# Altium schematic symbol library PM.SchLib: 61 symbols (part 2 of 2)
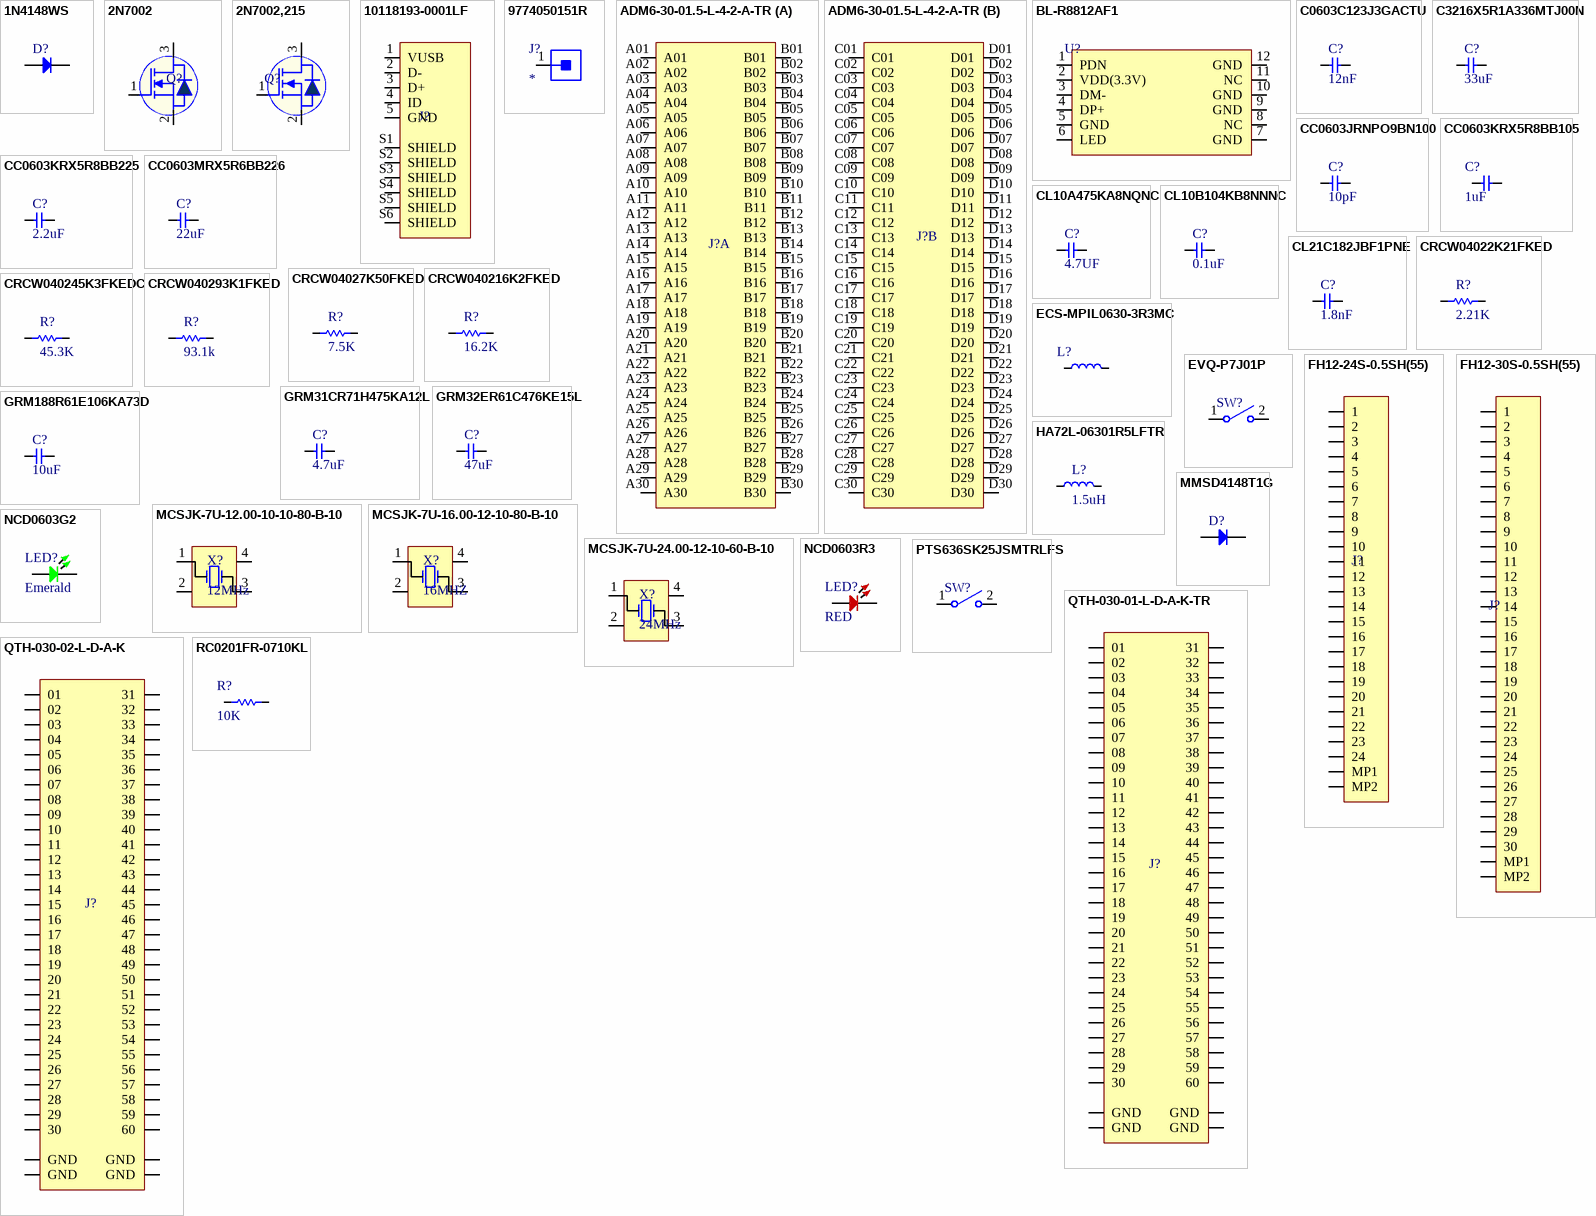
[diagram p2: symbols 1N4148WS to RC0201FR-0710KL]

## MCSJK-7U-12.00-10-10-80-B-10
designator X?, comment 12MHz
Crystal, 12Mhz, 10Pf, 3.2Mm X 2.5Mm Frequency Nom 12Mhz Crystal Case Smd Rohs; Manufacturer: Multicomp; Manufacturer Part Number: MCSJK-7U-12.00-10-10-80-B-10; Supplier: Newark; Supplier Part Number: 56AC8904; RoHS: Yes; Stock: 26807; Pricing: 1=0.428, 10=0.381, 100=0.3, 500=0.246, 1000=0.214, 5000=0.191, 10000=0.172, 25000=0.166 (USD); ComponentLink1URL: http://www.farnell.com/datasheets/2645227.pdf?src-supplier=Farnell; ComponentLink1Description: http://www.farnell.com/datasheets/2645227.pdf?src-supplier=Farnell; Item Type: Crystal
footprint MCSJK-7U-12.00-10-10-80-B-10
pins: 1 ENABLE CONTROL, 2 GND, 3 OUT PUT , 4 VDD

## MCSJK-7U-16.00-12-10-80-B-10
designator X?, comment 16MHZ
Crystal, 16MHZ, 12PF, 3.2MM X 2.5MM; Manufacturer: Multicomp; Manufacturer Part Number: MCSJK-7U-16.00-12-10-80-B-10; Supplier: Farnell; Supplier Part Number: 2853936; RoHS: No; Stock: 9269; Pricing: 5=0.201, 50=0.164, 250=0.143, 500=0.131, 1500=0.123, 3000=0.115, 15000=0.108, 30000=0.106 (GBP); ComponentLink1URL: http://www.farnell.com/datasheets/2864166.pdf?src-supplier=Farnell; ComponentLink1Description: http://www.farnell.com/datasheets/2864166.pdf?src-supplier=Farnell
footprint MCSJK-7U-16.00-12-10-80-B-10
pins: 1 ENABLE CONTROL, 2 GND, 3 OUT PUT , 4 VDD

## MCSJK-7U-24.00-12-10-60-B-10
designator X?, comment 24MHz
Crystal, 24Mhz, 12Pf, 3.2Mm X 2.5Mm; Manufacturer: Multicomp; Manufacturer Part Number: MCSJK-7U-24.00-12-10-60-B-10; Supplier: Newark; Supplier Part Number: 56AC8946; RoHS: No; Stock: 5313; Pricing: 5=0.328, 250=0.253, 500=0.227, 1000=0.207, 5000=0.189 (USD); Item Type: Crystal
footprint MCSJK-7U-24.00-12-10-60-B-10
pins: 1 ENABLE CONTROL, 2 GND, 3 OUT PUT , 4 VDD

## MMSD4148T1G
designator D?
DIODE GEN PURP 100V 200MA SOD123; Manufacturer: ON Semiconductor; Manufacturer Part Number: MMSD4148T1G; Reverse Recovery Time: 4ns; Peak Non-Repetitive Surge Current: 2A; Max Reverse Current: 5uA; Element Configuration: Single; Value: 4pF; Forward Voltage: 1V; Power Dissipation: 425mW; Polarity: Standard; Current Rating: 200A; Supplier: Future Electronics; Supplier Part Number: 4262259; RoHS: Yes; Category: Rectifier Diodes; Stock: 81000; Pricing: 3000=0.0149, 12000=0.0142, 45000=0.0137, 90000=0.0134, 225000=0.0127 (USD); Case/Package: SOD-123-2; Pins: 2; Min Operating Temperature: -55°C; Max Operating Temperature: 150°C; Max Repetitive Reverse Voltage (Vrrm): 100V; Forward Current: 200mA; Package Quantity: 3000; Packaging: Tape and Reel; Average Rectified Current: 200mA; Series: -; Recovery Time: 4ns; Max Surge Current: 2A; Max Forward Surge Current (Ifsm): 2A; Max Reverse Voltage (DC): 100V; Max Reverse Leakage Current: 5uA; Voltage Rating (DC): 100V; Output Current: 200mA; Reverse Recovery Time-Max: 4ns; Length: 2.69mm; Width: 1.6mm; Height: 1.12mm; Radiation Hardening: No; Lead Free: Lead Free; RoHS Compliant: Yes; Reach SVHC Compliant: No; Halogen Free: Halogen Free; ComponentLink1URL: https://datasheet.ciiva.com/22663/1707241-22663688.pdf?src-supplier=Element14; ComponentLink1Description: https://datasheet.ciiva.com/22663/1707241-22663688.pdf?src-supplier=Element14; ComponentLink2URL: https://datasheet.ciiva.com/8294/mmsd4148t1-d-8294902.pdf?src-supplier=Avnet; ComponentLink2Description: https://datasheet.ciiva.com/8294/mmsd4148t1-d-8294902.pdf?src-supplier=Avnet; ComponentLink3URL: https://datasheet.ciiva.com/915/mmsd4148t1-d-915383.pdf?src-supplier=Digi-Key; ComponentLink3Description: https://datasheet.ciiva.com/915/mmsd4148t1-d-915383.pdf?src-supplier=Digi-Key; ComponentLink4URL: https://datasheet.ciiva.com/915/mmsd4148t1-d-915384.pdf?src-supplier=Digi-Key; ComponentLink4Description: https://datasheet.ciiva.com/915/mmsd4148t1-d-915384.pdf?src-supplier=Digi-Key; ComponentLink5URL: https://datasheet.ciiva.com/915/mmsd4148t1-d-915385.pdf?src-supplier=Digi-Key; ComponentLink5Description: https://datasheet.ciiva.com/915/mmsd4148t1-d-915385.pdf?src-supplier=Digi-Key; ComponentLink6URL: https://datasheet.ciiva.com/8299/mmsd4148t1-d-8299883.pdf?src-supplier=Avnet; ComponentLink6Description: https://datasheet.ciiva.com/8299/mmsd4148t1-d-8299883.pdf?src-supplier=Avnet; ComponentLink7URL: https://datasheet.ciiva.com/16368/mmsd4148t1-d-16368570.pdf?src-supplier=Future+Electronics; ComponentLink7Description: https://datasheet.ciiva.com/16368/mmsd4148t1-d-16368570.pdf?src-supplier=Future+Electronics; ComponentLink8URL: https://datasheet.ciiva.com/8053/mmsd4148t1-d-8053692.pdf?src-supplier=Element14; ComponentLink8Description: https://datasheet.ciiva.com/8053/mmsd4148t1-d-8053692.pdf?src-supplier=Element14; ComponentLink9URL: https://datasheet.ciiva.com/8053/mmsd4148t1-d-8053693.pdf?src-supplier=Element14; ComponentLink9Description: https://datasheet.ciiva.com/8053/mmsd4148t1-d-8053693.pdf?src-supplier=Element14; ComponentLink10URL: https://datasheet.ciiva.com/15144/getdatasheetpartid-78734-15144509.pdf?src-supplier=Verical; ComponentLink10Description: https://datasheet.ciiva.com/15144/getdatasheetpartid-78734-15144509.pdf?src-supplier=Verical; LCSC Part Number: C11177; Item Type: Diode
footprint SOD-123
pins: 1 A, 2 K

## NCD0603G2
designator LED?, comment Emerald
Emerald 0603 Light Emitting Diodes (LED) ROHS; Manufacturer: Foshan NationStar Optoelectronics; Manufacturer Part Number: NCD0603G2; Package: 0603; LCSC Part Number: C87326; Item Type: LED; ComponentLink1Description: LCSC; ComponentLink1URL: https://www.lcsc.com/product-detail/Light-Emitting-Diodes-LED_Foshan-NationStar-Optoelectronics-NCD0603G2_C87326.html
footprint LED-0603
pins: 1, 2

## NCD0603R3
designator LED?, comment RED
RED LED 0603 Light Emitting Diodes; Manufacturer: Foshan NationStar Optoelectronics; Manufacturer Part Number: NCD0603R3; Package: 0603; Item Type: LED; LCSC Part Number: C3151730; ComponentLink1Description: LCSC; ComponentLink1URL: https://www.lcsc.com/product-detail/Light-Emitting-Diodes-LED_Foshan-NationStar-Optoelectronics-NCD0603R3_C3151730.html
footprint LED-0603
pins: 1, 2

## PTS636SK25JSMTRLFS
designator SW?
TACT 6.0 X 3.5, 2.5 MM H, 250GF,; Manufacturer: ITT C&K; Manufacturer Part Number: PTS636SK25JSMTRLFS; Item Type: Tactile Switch; Supplier: Digi-Key; Supplier Part Number: CKN12326-1-ND; RoHS: No; Stock: 75547; Pricing: 1=0.2, 10=0.19, 25=0.1804, 100=0.1641, 250=0.15428, 500=0.14114, 1000=0.11817 (USD)
footprint PTS636 SK25J SMTR LFS
pins: 1, 2

## QTH-030-01-L-D-A-K-TR
designator J?
CONN HDR 60POS SMD GOLD; Manufacturer: Samtec; Manufacturer Part Number: QTH-030-01-L-D-A-K-TR; Supplier: Rs; Supplier Part Number: 1802786; RoHS: Yes; Category: Connectors; Stock: 69; Pricing: 1=9.4, 25=8.99, 100=7.57, 250=6.25, 500=6.09 (GBP); ComponentLink1URL: https://datasheet.ciiva.com/9698/qth-9698170.pdf?src-supplier=Avnet; ComponentLink1Description: https://datasheet.ciiva.com/9698/qth-9698170.pdf?src-supplier=Avnet; ComponentLink2URL: https://datasheet.ciiva.com/400/qth-xxx-xx-x-d-xxx-mkt-400842.pdf?src-supplier=Digikey; ComponentLink2Description: https://datasheet.ciiva.com/400/qth-xxx-xx-x-d-xxx-mkt-400842.pdf?src-supplier=Digikey
footprint QTH-030-01-L-D-A-K-TR
pins: 01, 02, 03, 04, 05, 06, 07, 08, 09, 10, 11, 12, 13, 14, 15, 16, 17, 18, 19, 20, 21, 22, 23, 24, 25, 26, 27, 28, 29, 30, 31, 32, 33, 34, 35, 36, 37, 38, 39, 40, 41, 42, 43, 44, 45, 46, 47, 48, 49, 50, 51, 52, 53, 54, 55, 56, 57, 58, 59, 60, G1 GND (power), G2 GND (power), G3 GND (power), G4 GND (power)

## QTH-030-02-L-D-A-K
designator J?
CONN HDR 60POS SMD GOLD; Manufacturer: Samtec; Manufacturer Part Number: QTH-030-02-L-D-A-K; Number of Contacts: 60; Max Voltage Rating (AC): 125V; Gender: Male; Pitch: 0.5mm; Mated Stacking Heights: 8mm; Item Type: Connector; Supplier: Arrow Electronics; Supplier Part Number: QTH-030-02-L-D-A-K; RoHS: Yes; Category: Connectors; Stock: 29; Pricing: 1=8.646, 10=8.559, 25=8.474, 50=8.389, 100=6.689, 500=6.094, 1000=4.825, 2990=4.218, 8060=4.114, 17420=4.004 (USD); Contact Plating: Gold; Contact Material: Bronze; Housing Material: Polymer; Min Operating Temperature: -55°C; Max Operating Temperature: 125°C; Number of Rows: 2; Termination: Solder; Series: Q Strip® QTH; Number of Positions: 60; Orientation: Straight; Length: 20mm; Depth: 7.11mm; RoHS Compliant: Yes; ComponentLink1URL: https://datasheet.ciiva.com/9698/qth-9698092.pdf?src-supplier=Avnet; ComponentLink1Description: https://datasheet.ciiva.com/9698/qth-9698092.pdf?src-supplier=Avnet
footprint QTH-030-02-L-D-A-K
pins: 01, 02, 03, 04, 05, 06, 07, 08, 09, 10, 11, 12, 13, 14, 15, 16, 17, 18, 19, 20, 21, 22, 23, 24, 25, 26, 27, 28, 29, 30, 31, 32, 33, 34, 35, 36, 37, 38, 39, 40, 41, 42, 43, 44, 45, 46, 47, 48, 49, 50, 51, 52, 53, 54, 55, 56, 57, 58, 59, 60, G1 GND (power), G2 GND (power), G3 GND (power), G4 GND (power)

## RC0201FR-0710KL
designator R?, comment 10K
RES SMD 10K OHM 1% 1/20W 0201; Manufacturer: Yageo; Manufacturer Part Number: RC0201FR-0710KL; Item Type: Resistor; Package: 0201; ComponentLink7Description: LCSC; ComponentLink7URL: https://www.lcsc.com/product-detail/Chip-Resistor-Surface-Mount_YAGEO-RC0201FR-0710KL_C106225.html; LCSC Part Number: C106225
footprint Res-0201
pins: 1, 2

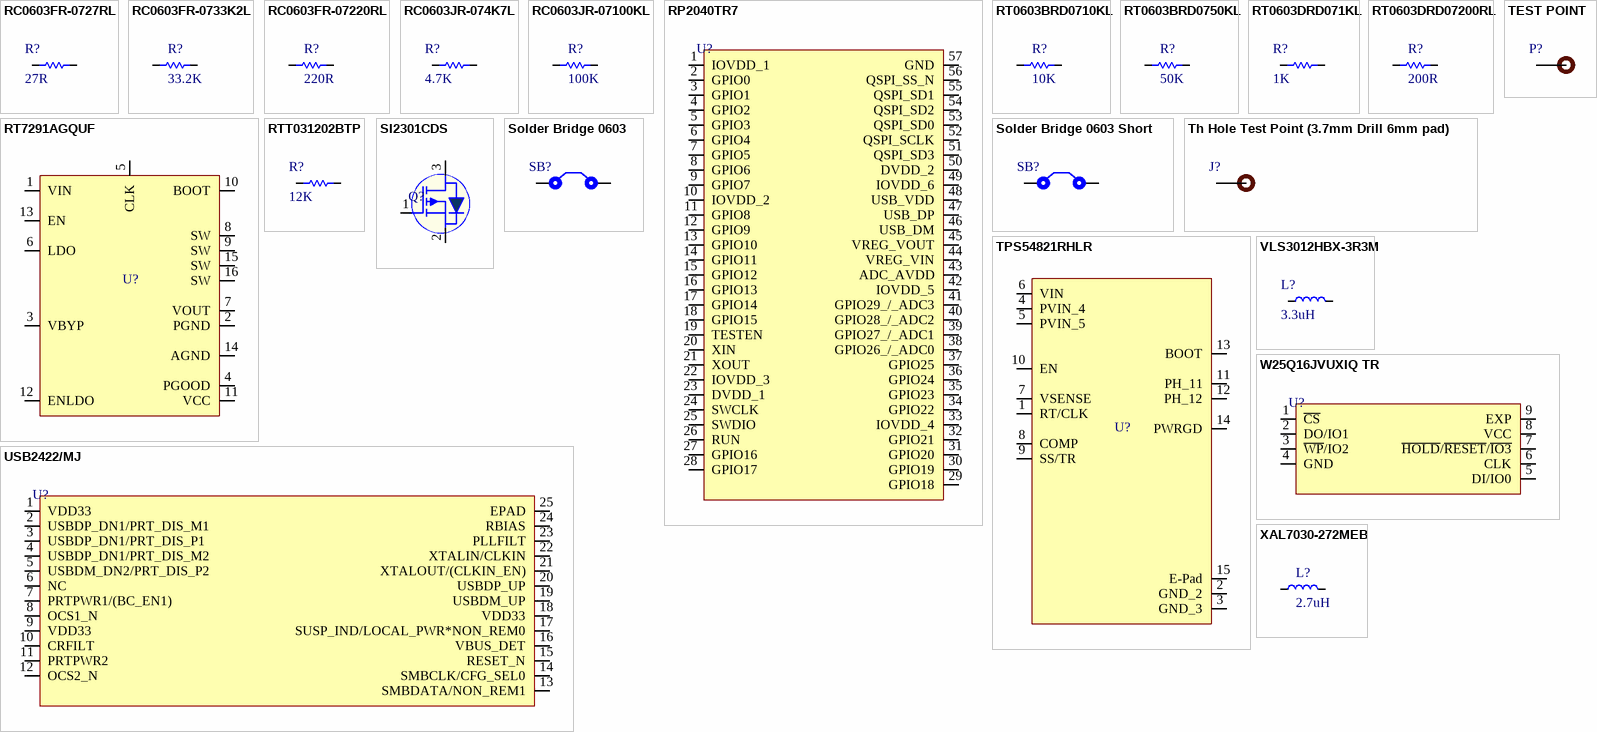
[diagram p1: symbols RC0603FR-0727RL to XAL7030-272MEB]

## RC0603FR-0727RL
designator R?, comment 27R
RES 27 OHM 1% 1/10W 0603; Manufacturer: Yageo; Manufacturer Part Number: RC0603FR-0727RL; Voltage Rating (DC): 50V; Temperature Coefficient: 100ppm/°C; Power Rating: 100mW; Item Type: Resistor; Supplier 1: Future Electronics; RoHS: Yes; Category: Chip SMD Resistors; Stock 1: 285000; Pricing 1: 5000=0.0015, 50000=0.0014, 200000=0.0014, 625000=0.0013, 2000000=0.0012 (USD); Case/Package: 0603; Pins: 2; Case Code (Metric): 1608; Case Code (Imperial): 0603; Min Operating Temperature: -55°C; Max Operating Temperature: 155°C; Value: 27R; Tolerance: 1%; Packaging: Tape and Reel; Resistor Type: Thick Film; Number of Terminations: 2; Voltage Rating: 50V; Termination: SMD/SMT; Max Power Dissipation: 100mW; Features: Moisture Resistant; Series: RC; Resistance Tolerance: 1%; Width: 0.8mm; Lead Free: Lead Free; Reach SVHC Compliant: Unknown; RoHS Compliant: Yes; ComponentLink1URL: https://datasheet.ciiva.com/2454/pyu-r-int-thick-7-2454031.pdf?src-supplier=Digi-Key; ComponentLink1Description: https://datasheet.ciiva.com/2454/pyu-r-int-thick-7-2454031.pdf?src-supplier=Digi-Key; ComponentLink2URL: https://datasheet.ciiva.com/2454/pyu-r-int-thick-7-2454032.pdf?src-supplier=Digi-Key; ComponentLink2Description: https://datasheet.ciiva.com/2454/pyu-r-int-thick-7-2454032.pdf?src-supplier=Digi-Key; ComponentLink3URL: https://datasheet.ciiva.com/2454/pyu-r-int-thick-7-2454030.pdf?src-supplier=Digi-Key; ComponentLink3Description: https://datasheet.ciiva.com/2454/pyu-r-int-thick-7-2454030.pdf?src-supplier=Digi-Key; ComponentLink4URL: https://datasheet.ciiva.com/7746/443971-7746313.pdf?src-supplier=Element14; ComponentLink4Description: https://datasheet.ciiva.com/7746/443971-7746313.pdf?src-supplier=Element14; ComponentLink5URL: https://datasheet.ciiva.com/7746/443971-7746314.pdf?src-supplier=Element14; ComponentLink5Description: https://datasheet.ciiva.com/7746/443971-7746314.pdf?src-supplier=Element14; Supplier Part Number 1: 9798455; LCSC Part Number: C137753
footprint Res-0603
pins: 1, 2

## RC0603FR-0733K2L
designator R?, comment 33.2K
RES 33.2K OHM 1% 1/10W 0603; Manufacturer: Yageo; Manufacturer Part Number: RC0603FR-0733K2L; Resistance: 33.2kR; Power Rating: 100mW; Voltage Rating: 50V; Temperature Coefficient: 100ppm/°C; Supplier 1: Digi-Key; RoHS: Yes; Category: Chip SMD Resistors; Stock 1: 1293262; Pricing 1: 1=0.10000, 10=0.02300, 100=0.00930, 1000=0.00417, 2500=0.00362 (USD); Mount: Surface Mount; Case/Package: 0603; Case Code (Imperial): 0603; Case Code (Metric): 1608; Size Code: 0603; Min Operating Temperature: -55°C; Max Operating Temperature: 155°C; Tolerance: 1%; Packaging: Tape and Reel; Termination: SMD/SMT; Resistor Type: Thick Film; Voltage Rating (DC): 50V; Features: Moisture Resistant; Series: RC; Max Power Dissipation: 100mW; Number of Terminations: 2; Construction: Rectangular; Technology: THICK FILM; Length: 1.6mm; Height: 0.45mm; Depth: 0.8mm; Military Standard: Not; Lead Free: Lead Free; RoHS Compliant: Yes; ComponentLink1URL: https://datasheet.ciiva.com/11808/0900766b80f96399-11808316.pdf?src-supplier=RSComponents; ComponentLink1Description: https://datasheet.ciiva.com/11808/0900766b80f96399-11808316.pdf?src-supplier=RSComponents; Supplier Part Number 1: 311-33.2KHRCT-ND; LCSC Part Number: C185338
footprint Res-0603
pins: 1, 2

## RC0603FR-07220RL
designator R?, comment 220R
RES SMD 220 OHM 1% 1/10W 0603; Manufacturer: Yageo; Manufacturer Part Number: RC0603FR-07220RL; Temperature Coefficient: 100ppm/°C; Voltage Rating (DC): 50V; Power Rating: 100mW; Item Type: Resistor; Supplier 1: Digi-Key; Stock 1: 5843995; Pricing 1: 1=0.1, 10=0.023, 100=0.0094, 1000=0.00421, 2500=0.00366 (USD); Case/Package: 0603; Number of Pins: 2; Case Code (Imperial): 0603; Case Code (Metric): 1608; Min Operating Temperature: -55°C; Max Operating Temperature: 155°C; Resistance: 220R; Tolerance: 1%; Composition: Thick Film; Packaging: Tape and Reel; Voltage Rating: 50V; Package Quantity: 1; Termination: SMD/SMT; Number of Terminations: 2; Military Standard: Not; Max Power Dissipation: 100mW; Features: Moisture Resistant; Length: 1.6mm; Height: 0.022inch; Width: 0.031inch; Depth: 0.8mm; REACH SVHC: No SVHC; Lead Free: Lead Free; ComponentLink1URL: http://www.yageo.com/documents/recent/PYu-RC_Group_51_RoHS_L_10.pdf?src-supplier=Digi-Key; ComponentLink1Description: http://www.yageo.com/documents/recent/PYu-RC_Group_51_RoHS_L_10.pdf?src-supplier=Digi-Key; ComponentLink2URL: http://www.farnell.com/datasheets/1868787.pdf?src-supplier=Element14; ComponentLink2Description: http://www.farnell.com/datasheets/1868787.pdf?src-supplier=Element14; Supplier Part Number 1: 311-220HRCT-ND; LCSC Part Number: C107696
footprint Res-0603
pins: 1, 2

## RC0603JR-074K7L
designator R?, comment 4.7K
RES SMD 4.7K OHM 5% 1/10W 0603; Manufacturer: Yageo; Manufacturer Part Number: RC0603JR-074K7L; Resistance: 4.7kR; Temperature Coefficient: 100ppm/°C; Voltage Rating (DC): 50V; Power Rating: 100mW; Item Type: Resistor; Supplier 1: Digi-Key; Stock 1: 19706643; Pricing 1: 1=0.1, 10=0.02, 100=0.0081, 1000=0.00362, 2500=0.00314 (USD); Case/Package: 0603; Number of Pins: 2; Case Code (Imperial): 0603; Case Code (Metric): 1608; Min Operating Temperature: -55°C; Max Operating Temperature: 155°C; Tolerance: 5%; Composition: Thick Film; Packaging: Tape and Reel; Voltage Rating: 50V; Termination: SMD/SMT; Military Standard: Not; Length: 1.6mm; Width: 0.8mm; Depth: 0.8mm; REACH SVHC: No SVHC; Lead Free: Lead Free; ComponentLink1URL: http://www.farnell.com/datasheets/443971.pdf?src-supplier=Element14; ComponentLink1Description: http://www.farnell.com/datasheets/443971.pdf?src-supplier=Element14; Supplier Part Number 1: 311-4.7KGRCT-ND; LCSC Part Number: C105428
footprint Res-0603
pins: 1, 2

## RC0603JR-07100KL
designator R?, comment 100K
RES 100K OHM 5% 1/10W 0603; Manufacturer: Yageo; Manufacturer Part Number: RC0603JR-07100KL; Resistance: 100kR; Temperature Coefficient: 100ppm/°C; Voltage Rating: 50V; Power Rating: 100mW; Item Type: Resistor; Supplier 1: Digi-Key; RoHS: Yes; Category: Chip SMD Resistors; Stock 1: 1210037; Pricing 1: 1=0.10000, 10=0.02000, 100=0.00800, 1000=0.00360, 2500=0.00312 (USD); Case/Package: 0603; Number of Pins: 2; Contact Plating: Tin,Matte; Case Code (Imperial): 0603; Case Code (Metric): 1608; Size Code: 0603; Min Operating Temperature: -55°C; Max Operating Temperature: 155°C; Tolerance: 5%; Resistor Type: Thick Film; Packaging: Tape and Reel; Voltage Rating (DC): 50V; Termination: SMD/SMT; Features: Moisture Resistant; Series: RC; Max Power Dissipation: 100mW; Number of Terminations: 2; Resistance Tolerance: 5%; Width: 0.8mm; Radiation Hardening: No; REACH SVHC: No SVHC; Lead Free: Lead Free; RoHS Compliant: Yes; ComponentLink1URL: https://datasheet.ciiva.com/7746/443971-7746424.pdf?src-supplier=Element14; ComponentLink1Description: https://datasheet.ciiva.com/7746/443971-7746424.pdf?src-supplier=Element14; ComponentLink2URL: https://datasheet.ciiva.com/7983/443971-7983686.pdf?src-supplier=Element14; ComponentLink2Description: https://datasheet.ciiva.com/7983/443971-7983686.pdf?src-supplier=Element14; ComponentLink3URL: https://datasheet.ciiva.com/7746/443971-7746423.pdf?src-supplier=Element14; ComponentLink3Description: https://datasheet.ciiva.com/7746/443971-7746423.pdf?src-supplier=Element14; ComponentLink4URL: https://datasheet.ciiva.com/8887/pyu-rc0603-51-rohs-l-4-8887903.pdf?src-supplier=Avnet; ComponentLink4Description: https://datasheet.ciiva.com/8887/pyu-rc0603-51-rohs-l-4-8887903.pdf?src-supplier=Avnet; Supplier Part Number 1: 311-100KGRCT-ND; LCSC Part Number: C100048
footprint Res-0603
footprint Res-0603
pins: 1, 2

## RP2040TR7
designator U?
Rectifier Diode, 1 Phase, 1 Element, 2A, 400V V(RRM), Silicon, DO-15; Manufacturer: Raspberry Pi; Manufacturer Part Number: RP2040TR7; Supplier: Farnell; Supplier Part Number: 3766079; RoHS: No; Category: Uncategorized; Stock: 11495; Pricing: 500=0.645 (GBP)
footprint QFN-56 (7x7)
pins: 1 IOVDD_1, 2 GPIO0, 3 GPIO1, 4 GPIO2, 5 GPIO3, 6 GPIO4, 7 GPIO5, 8 GPIO6, 9 GPIO7, 10 IOVDD_2, 11 GPIO8, 12 GPIO9, 13 GPIO10, 14 GPIO11, 15 GPIO12, 16 GPIO13, 17 GPIO14, 18 GPIO15, 19 TESTEN, 20 XIN, 21 XOUT, 22 IOVDD_3, 23 DVDD_1, 24 SWCLK, 25 SWDIO, 26 RUN, 27 GPIO16, 28 GPIO17, 29 GPIO18, 30 GPIO19, 31 GPIO20, 32 GPIO21, 33 IOVDD_4, 34 GPIO22, 35 GPIO23, 36 GPIO24, 37 GPIO25, 38 GPIO26_/_ADC0, 39 GPIO27_/_ADC1, 40 GPIO28_/_ADC2, 41 GPIO29_/_ADC3, 42 IOVDD_5, 43 ADC_AVDD, 44 VREG_VIN, 45 VREG_VOUT, 46 USB_DM, 47 USB_DP, 48 USB_VDD, 49 IOVDD_6, 50 DVDD_2, 51 QSPI_SD3, 52 QSPI_SCLK, 53 QSPI_SD0, 54 QSPI_SD2, 55 QSPI_SD1, 56 QSPI_SS_N, 57 GND

## RT0603BRD0710KL
designator R?, comment 10K
RES SMD 10K OHM 0.1% 1/10W 0603; Manufacturer: Yageo; Manufacturer Part Number: RT0603BRD0710KL; Power: 100mW; Rated Temperature: 70°C; Value: 10kR; Temperature Coefficient: 25ppm/°C; Working Voltage: 75V; Package Height: 0.45mm; Package Length: 1.6mm; Package Width: 0.8mm; Item Type: Resistor; Supplier 1: Rs; RoHS: Yes; Category: Chip SMD Resistors; Stock 1: 20510; Pricing 1: 100=0.29800, 250=0.27800, 500=0.25900, 1000=0.23700 (GBP); Mounting Technology: Surface Mount; Pins: 2; Case/Package: 0603; Min Operating Temperature: -55°C; Max Operating Temperature: 155°C; Tolerance: 0.1%; Resistor Type: FIXED RESISTOR; Construction: Chip; Package Style: SMTMeter; Packaging: Tape and Reel; Technology: THIN FILM; Termination: Wraparound; Reach SVHC Compliant: Yes; RoHS Compliant: Yes; ComponentLink1URL: https://datasheet.ciiva.com:443/pdfs/VipMasterIC/IC/YAGO/YAGO-S-A0008510989/YAGO-S-A0008510989-1.pdf?src-supplier=IHS+Markit; ComponentLink1Description: https://datasheet.ciiva.com:443/pdfs/VipMasterIC/IC/YAGO/YAGO-S-A0008510989/YAGO-S-A0008510989-1.pdf?src-supplier=IHS+Markit; ComponentLink2URL: https://datasheet.ciiva.com/5624/pyu-rt-1-to-0-05-rohs-l-4-5624351.pdf?src-supplier=Mouser; ComponentLink2Description: https://datasheet.ciiva.com/5624/pyu-rt-1-to-0-05-rohs-l-4-5624351.pdf?src-supplier=Mouser; ComponentLink3URL: https://datasheet.ciiva.com/29721/pyu-rt-1-to-0-05-rohs-l-4-29721177.pdf?src-supplier=Digi-Key; ComponentLink3Description: https://datasheet.ciiva.com/29721/pyu-rt-1-to-0-05-rohs-l-4-29721177.pdf?src-supplier=Digi-Key; Supplier Part Number 1: 1991391P; LCSC Part Number: C95204
footprint Res-0603
pins: 1, 2

## RT0603BRD0750KL
designator R?, comment 50K
RES 50K OHM 0.1% 1/10W 0603; Manufacturer: Yageo; Manufacturer Part Number: RT0603BRD0750KL; Value: 50kR; Max Power Dissipation: 100mW; Temperature Coefficient: 25ppm/°C; Voltage Rating: 75V; Item Type: Resistor; Supplier: Future Electronics; Supplier Part Number: 3072856; RoHS: No; Category: Chip SMD Resistors; Stock: 70000; Pricing: 5000=0.0213, 15000=0.0206, 25000=0.0211, 50000=0.0198, 100000=0.0194, 200000=0.0186 (USD); Case/Package: 0603; Min Operating Temperature: -55°C; Max Operating Temperature: 155°C; Series: RT; Packaging: Tape and Reel; Tolerance: 0.1%; Number of Terminations: 2; Power Rating: 100mW; Height: 550um; ComponentLink1URL: https://www.yageo.com/upload/media/product/productsearch/datasheet/rchip/PYu-RT_1-to-0.01_RoHS_L_12.pdf?src-supplier=Digikey; ComponentLink1Description: https://www.yageo.com/upload/media/product/productsearch/datasheet/rchip/PYu-RT_1-to-0.01_RoHS_L_12.pdf?src-supplier=Digikey; LCSC Part Number: C861451
footprint Res-0603
pins: 1, 2

## RT0603DRD071KL
designator R?, comment 1K
RES SMD 1K OHM 0.5% 1/10W 0603; Manufacturer: Yageo; Manufacturer Part Number: RT0603DRD071KL; Resistance: 1kR; Temperature Coefficient: 25ppm/°C; Power Rating: 100mW; Voltage Rating: 75V; Voltage Rating (DC): 50V; Supplier 1: Digi-Key; Stock 1: 178947; Pricing 1: 1=0.2, 10=0.167, 100=0.0651, 1000=0.02725, 2500=0.02498 (USD); Case/Package: 0603; Contact Plating: Tin,Matte; Case Code (Metric): 1608; Case Code (Imperial): 0603; Min Operating Temperature: -55°C; Max Operating Temperature: 125°C; Tolerance: 0.5%; Composition: Thin Film; Packaging: Tape and Reel; Termination: SMD/SMT; Radiation Hardening: No; Lead Free: Lead Free; ComponentLink1URL: http://www.mouser.com/ds/2/447/yageodocoutput-1125656.pdf?src-supplier=Mouser; ComponentLink1Description: http://www.mouser.com/ds/2/447/yageodocoutput-1125656.pdf?src-supplier=Mouser; ComponentLink2URL: http://www.yageo.com/documents/recent/PYu-RT_1-to-0.05_RoHS_L_6.pdf?src-supplier=Avnet; ComponentLink2Description: http://www.yageo.com/documents/recent/PYu-RT_1-to-0.05_RoHS_L_6.pdf?src-supplier=Avnet; Supplier Part Number 1: 311-1.0KDDKR-ND; LCSC Part Number: C165964
footprint Res-0603
pins: 1, 2

## RT0603DRD07200RL
designator R?, comment 200R
RES SMD 200 OHM 0.5% 1/10W 0603; Manufacturer: Yageo; Manufacturer Part Number: RT0603DRD07200RL; Power Rating: 100mW; Voltage Rating (DC): 50V; Supplier 1: Digi-Key; Stock 1: 19572; Pricing 1: 1=0.21, 10=0.174, 100=0.0682, 1000=0.02855, 2500=0.02617 (USD); Case/Package: 0603; Resistance: 200R; Tolerance: 0.5%; Packaging: Cut Tape; Lead Free: Lead Free; Supplier Part Number 1: 311-200DCT-ND; LCSC Part Number: C700498
footprint Res-0603
footprint Res-0603
pins: 1, 2

## RT7291AGQUF
designator U?
Step-down type Fixed 5V 5V~23V 6A QFN-16(3x3) DC-DC Converters ROHS; Manufacturer: Richtek; Manufacturer Part Number: RT7291AGQUF; Item Type: IC; Supplier: Digi-Key; Supplier Part Number: 1028-RT7291AGQUFCT-ND; RoHS: No; Category: Voltage Regulators - Switching; Stock: 1332; Pricing: 1=2.62, 10=2.355, 25=2.222, 100=1.8931, 250=1.7776, 500=1.5554 (USD); LCSC Part Number: C425179
footprint QFN-16(3x3) RT7291AGQUF
pins: 1 VIN, 2 PGND, 3 VBYP, 4 PGOOD, 5 CLK, 6 LDO, 7 VOUT, 8 SW, 9 SW, 10 BOOT, 11 VCC, 12 ENLDO, 13 EN, 14 AGND, 15 SW, 16 SW

## RTT031202BTP
designator R?, comment 12K
12kΩ 0603 Chip Resistor - Surface Mount ROHS; Manufacturer: RALEC; Manufacturer Part Number: RTT031202BTP; Footprint: 0603; ComponentLink1Description: LCSC; ComponentLink1URL: https://lcsc.com/product-detail/Chip-span-style-background-color-ff0-Resistor-span-Surface-Mount_RALEC-RTT031202BTP_C2981490.html; LCSC Part Number: C2981490
footprint Res-0603
pins: 1, 2

## SI2301CDS
designator Q?
null 3A 400mW 112mΩ@4.5V,2.8A 1V@250uA P Channel SOT-23 MOSFETs ROHS; Manufacturer: FUXINSEMI; Manufacturer Part Number: SI2301CDS; Item Type: MOSFET; LCSC Part Number: C5290223; ComponentLink1Description: LCSC; ComponentLink1URL: https://www.lcsc.com/product-detail/MOSFETs_FUXINSEMI-SI2301CDS_C5290223.html; Package: Sot-23
footprint SOT-23 (TRANS NPN 40V 0.6A SOT23)
pins: 1 G, 2 S, 3 D

## Solder Bridge 0603
designator SB?
Solder Bridge ON; Manufacturer Part Number: Solder Bridge; Item Type: Solder Bridge
footprint Solder Bridge (Solder Bridge ON)
pins: 1, 2

## Solder Bridge 0603 Short
designator SB?
Solder Bridge Short; Manufacturer Part Number: Solder Bridge; Item Type: Solder Bridge
footprint Solder Bridge Short (Solder Bridge ON)
pins: 1, 2

## TEST POINT
designator P?
Test Point ON; Item Type: TEST POINT; Manufacturer Part Number: TEST POINT
footprint Test-point
pins: 1

## Th Hole Test Point (3.7mm Drill 6mm pad)
designator J?
-; Manufacturer Part Number: Th Hole Test Point; Item Type: Test Point
footprint Th Hole Test Point (3.7mm Drill 6mm pad)
pins: 1

## TPS54821RHLR
designator U?
IC REG BUCK ADJ 8A SYNC 14QFN; Manufacturer: Texas Instruments; Manufacturer Part Number: TPS54821RHLR; Number of Outputs: 1; Min Input Voltage: 4.5V; Output Voltage: 15V; Max Supply Voltage: 17V; Switching Frequency: 1.6MHz; Synchronous Rectifier: Yes; Min Output Voltage: 600mV; Quiescent Current: 600uA; Output Type: Adjustable; Supplier: Mouser; Supplier Part Number: 595-TPS54821RHLR; RoHS: Yes; Category: Voltage Regulators - Switching; Stock: 4682; Pricing: 1=3.54, 10=3.01, 50=3.01, 100=2.61, 1000=1.87, 10000=1.78 (USD); Mounting Technology: Surface Mount; Case/Package: VQFN; Pins: 14; Min Operating Temperature: -40°C; Max Operating Temperature: 125°C; Output Current: 8A; Packaging: Tape and Reel; Max Output current: 8A; Package Quantity: 1; Max Output Voltage: 15V; Series: SWIFT™; Reach SVHC Compliant: No; Lead Free: Lead Free; RoHS Compliant: Yes; ComponentLink1URL: https://datasheet.ciiva.com/4880/slvsb14-119265-4880587.pdf?src-supplier=Mouser; ComponentLink1Description: https://datasheet.ciiva.com/4880/slvsb14-119265-4880587.pdf?src-supplier=Mouser; ComponentLink2URL: https://datasheet.ciiva.com/14378/tps54821-14378259.pdf?src-supplier=Avnet; ComponentLink2Description: https://datasheet.ciiva.com/14378/tps54821-14378259.pdf?src-supplier=Avnet; ComponentLink3URL: https://datasheet.ciiva.com/4120/51625541s9316726n7713-4120068.pdf?src-supplier=Arrow+Electronics; ComponentLink3Description: https://datasheet.ciiva.com/4120/51625541s9316726n7713-4120068.pdf?src-supplier=Arrow+Electronics; ComponentLink4URL: https://datasheet.ciiva.com/2035/tps54821-2035485.pdf?src-supplier=Digi-Key; ComponentLink4Description: https://datasheet.ciiva.com/2035/tps54821-2035485.pdf?src-supplier=Digi-Key; ComponentLink5URL: https://datasheet.ciiva.com/2035/tps54821-2035484.pdf?src-supplier=Digi-Key; ComponentLink5Description: https://datasheet.ciiva.com/2035/tps54821-2035484.pdf?src-supplier=Digi-Key; ComponentLink6URL: https://datasheet.ciiva.com/2035/tps54821-2035486.pdf?src-supplier=Digi-Key; ComponentLink6Description: https://datasheet.ciiva.com/2035/tps54821-2035486.pdf?src-supplier=Digi-Key
footprint 14-VQFN (3.5x3.5)
pins: 1 RT/CLK, 2 GND_2, 3 GND_3, 4 PVIN_4, 5 PVIN_5, 6 VIN, 7 VSENSE, 8 COMP, 9 SS/TR, 10 EN, 11 PH_11, 12 PH_12, 13 BOOT, 14 PWRGD, 15 E-Pad

## USB2422/MJ
designator U?
Hub Controller USB QFN-24-EP(4x4) USB ICs ROHS; Manufacturer: Microchip; Manufacturer Part Number: USB2422/MJ; Item Type: IC; Supplier: Avnet; Supplier Part Number: USB2422/MJ; RoHS: Yes; Category: USB Interface ICs; Stock: 330; Pricing: 490=1.5 (USD); ComponentLink1URL: http://components.arrow.com/part/dataview/58768923S663889N2064?src-supplier=Arrow+Electronics; ComponentLink1Description: http://components.arrow.com/part/dataview/58768923S663889N2064?src-supplier=Arrow+Electronics; ComponentLink2URL: http://www.mouser.com/ds/2/268/2422-319423.pdf?src-supplier=Mouser; ComponentLink2Description: http://www.mouser.com/ds/2/268/2422-319423.pdf?src-supplier=Mouser; ComponentLink3URL: http://www.microchip.com/mymicrochip/filehandler.aspx?ddocname=en566992&src-supplier=Digikey; ComponentLink3Description: http://www.microchip.com/mymicrochip/filehandler.aspx?ddocname=en566992&src-supplier=Digikey; ComponentLink4URL: https://datasheet.octopart.com/USB2422-MJ-Microchip-datasheet-42223901.pdf?src-supplier=Future+Electronics; ComponentLink4Description: https://datasheet.octopart.com/USB2422-MJ-Microchip-datasheet-42223901.pdf?src-supplier=Future+Electronics; LCSC Part Number: C633330
footprint 24-QFN (4x4)
pins: 1 VDD33, 2 USBDP_DN1/PRT_DIS_M1, 3 USBDP_DN1/PRT_DIS_P1, 4 USBDP_DN1/PRT_DIS_M2, 5 USBDM_DN2/PRT_DIS_P2, 6 NC, 7 PRTPWR1/(BC_EN1), 8 OCS1_N, 9 VDD33, 10 CRFILT, 11 PRTPWR2, 12 OCS2_N, 13 SMBDATA/NON_REM1, 14 SMBCLK/CFG_SEL0, 15 RESET_N, 16 VBUS_DET, 17 SUSP_IND/LOCAL_PWR*NON_REM0, 18 VDD33, 19 USBDM_UP, 20 USBDP_UP, 21 XTALOUT/(CLKIN_EN), 22 XTALIN/CLKIN, 23 PLLFILT, 24 RBIAS, 25 EPAD

## VLS3012HBX-3R3M
designator L?, comment 3.3uH
FIXED IND 3.3UH 2.63A 150MOHM SM; Manufacturer: TDK; Manufacturer Part Number: VLS3012HBX-3R3M; Core Material: Metal; Tolerance: 20%; Saturation Current: 2.82A; Shielding: Shielded; DC Resistance (DCR): 150mR; Test Frequency: 1MHz; Supplier: Digi-Key; Supplier Part Number: 445-175070-1-ND; RoHS: Yes; Category: Fixed Inductors; Stock: 9595; Pricing: 1=0.6, 10=0.512, 25=0.4692, 50=0.4264, 100=0.3795, 250=0.3582, 500=0.30702, 1000=0.27291 (USD); Mounting Technology: Surface Mount; Case/Package: Nonstandard; Min Operating Temperature: -40°C; Max Operating Temperature: 105°C; Packaging: Cut Tape; Value: 3.3uH; Current Rating: 2.63A; Series: VLS-HBX; RoHS Compliant: Yes; ComponentLink1URL: http://www.farnell.com/datasheets/2724074.pdf?src-supplier=Farnell; ComponentLink1Description: http://www.farnell.com/datasheets/2724074.pdf?src-supplier=Farnell; ComponentLink2URL: https://product.tdk.com/info/en/catalog/datasheets/inductor_commercial_power_vls3012hbx_en.pdf?src-supplier=Digi-Key; ComponentLink2Description: https://product.tdk.com/info/en/catalog/datasheets/inductor_commercial_power_vls3012hbx_en.pdf?src-supplier=Digi-Key; ComponentLink3URL: https://product.tdk.com/info/en/catalog/datasheets/inductor_commercial_power_vls3012hbx_en.pdf?ref_disty=digikey&src-supplier=Digi-Key; ComponentLink3Description: https://product.tdk.com/info/en/catalog/datasheets/inductor_commercial_power_vls3012hbx_en.pdf?ref_disty=digikey&src-supplier=Digi-Key; ComponentLink4URL: http://www.farnell.com/datasheets/2724074.pdf?src-supplier=Newark; ComponentLink4Description: http://www.farnell.com/datasheets/2724074.pdf?src-supplier=Newark
footprint VLS3012HBX-3R3M
pins: 1, 2

## W25Q16JVUXIQ TR
designator U?
IC FLASH 16MBIT SPI/QUAD 8USON; Manufacturer: Winbond; Manufacturer Part Number: W25Q16JVUXIQ TR; Supplier: Digi-Key; Supplier Part Number: 256-W25Q16JVUXIQTRCT-ND; RoHS: No; Category: Memory; Stock: 47295; Pricing: 1=0.56, 10=0.51, 25=0.504, 50=0.501, 100=0.4479, 250=0.44416, 500=0.43758, 1000=0.42193 (USD)
footprint 8-USON (2x3)
pins: 1 ~{CS}, 2 DO/IO1, 3 ~{WP}/IO2, 4 GND, 5 DI/IO0, 6 CLK, 7 ~{HOLD}/~{RESET}/~{IO3}, 8 VCC, 9 EXP

## XAL7030-272MEB
designator L?, comment 2.7uH
Power Inductors - SMD 2.7uH Shld 20% 11.4A 17.3mOhms AECQ2; Manufacturer: Coilcraft; Manufacturer Part Number: XAL7030-272MEB; Package: Custom; Item Type: Inductor
footprint XAL7030-272MEB
pins: 1, 2